# Altium schematic symbol library 2020-12-12_14-36-10.SchLib: 2 symbols
Pins are listed as number, name and electrical type; pins without a type are passive.

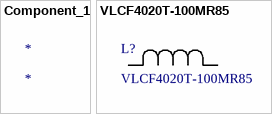
[diagram p0: symbols Component_1 to VLCF4020T-100MR85]

## Component_1
designator *

## VLCF4020T-100MR85
designator L?
No Description Available; Vendor: TDK; Built_By: EMA_UL_Team; SourceLibrary: TDK_2015_05_22; Manufacturer_Part_Number: VLCF4020T-100MR85; Copyright: Copyright (C) 2018 Accelerated Designs. All rights reserved
pins: 1, 2